# Altium schematic symbol library BA2032SM.SCHLIB: 1 symbol
Pins are listed as number, name and electrical type; pins without a type are passive.

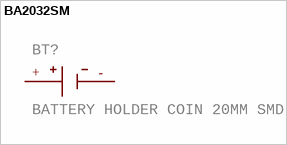
[diagram p0: symbol BA2032SM]

## BA2032SM
designator BT?, comment BATTERY HOLDER COIN 20MM SMD
GateName_1: G$1; SymbolName_1: BA2032SM; MF: MPD; LibraryName: BA2032SM; DeviceSetName: BA2032SM; Package: BAT_BA2032SM; Purchase-URL: https://pricing.snapeda.com/search/part/BA2032SM/?ref=eda; Package: None; Digi-Key_Part_Number: BA2032SM-ND; MP: BA2032SM; Description: BATTERY HOLDER COIN 20MM SMD
footprint BAT_BA2032SM
pins: +, -